# Altium schematic symbol library DIM.SCHLIB: 488 symbols (part 5 of 5)
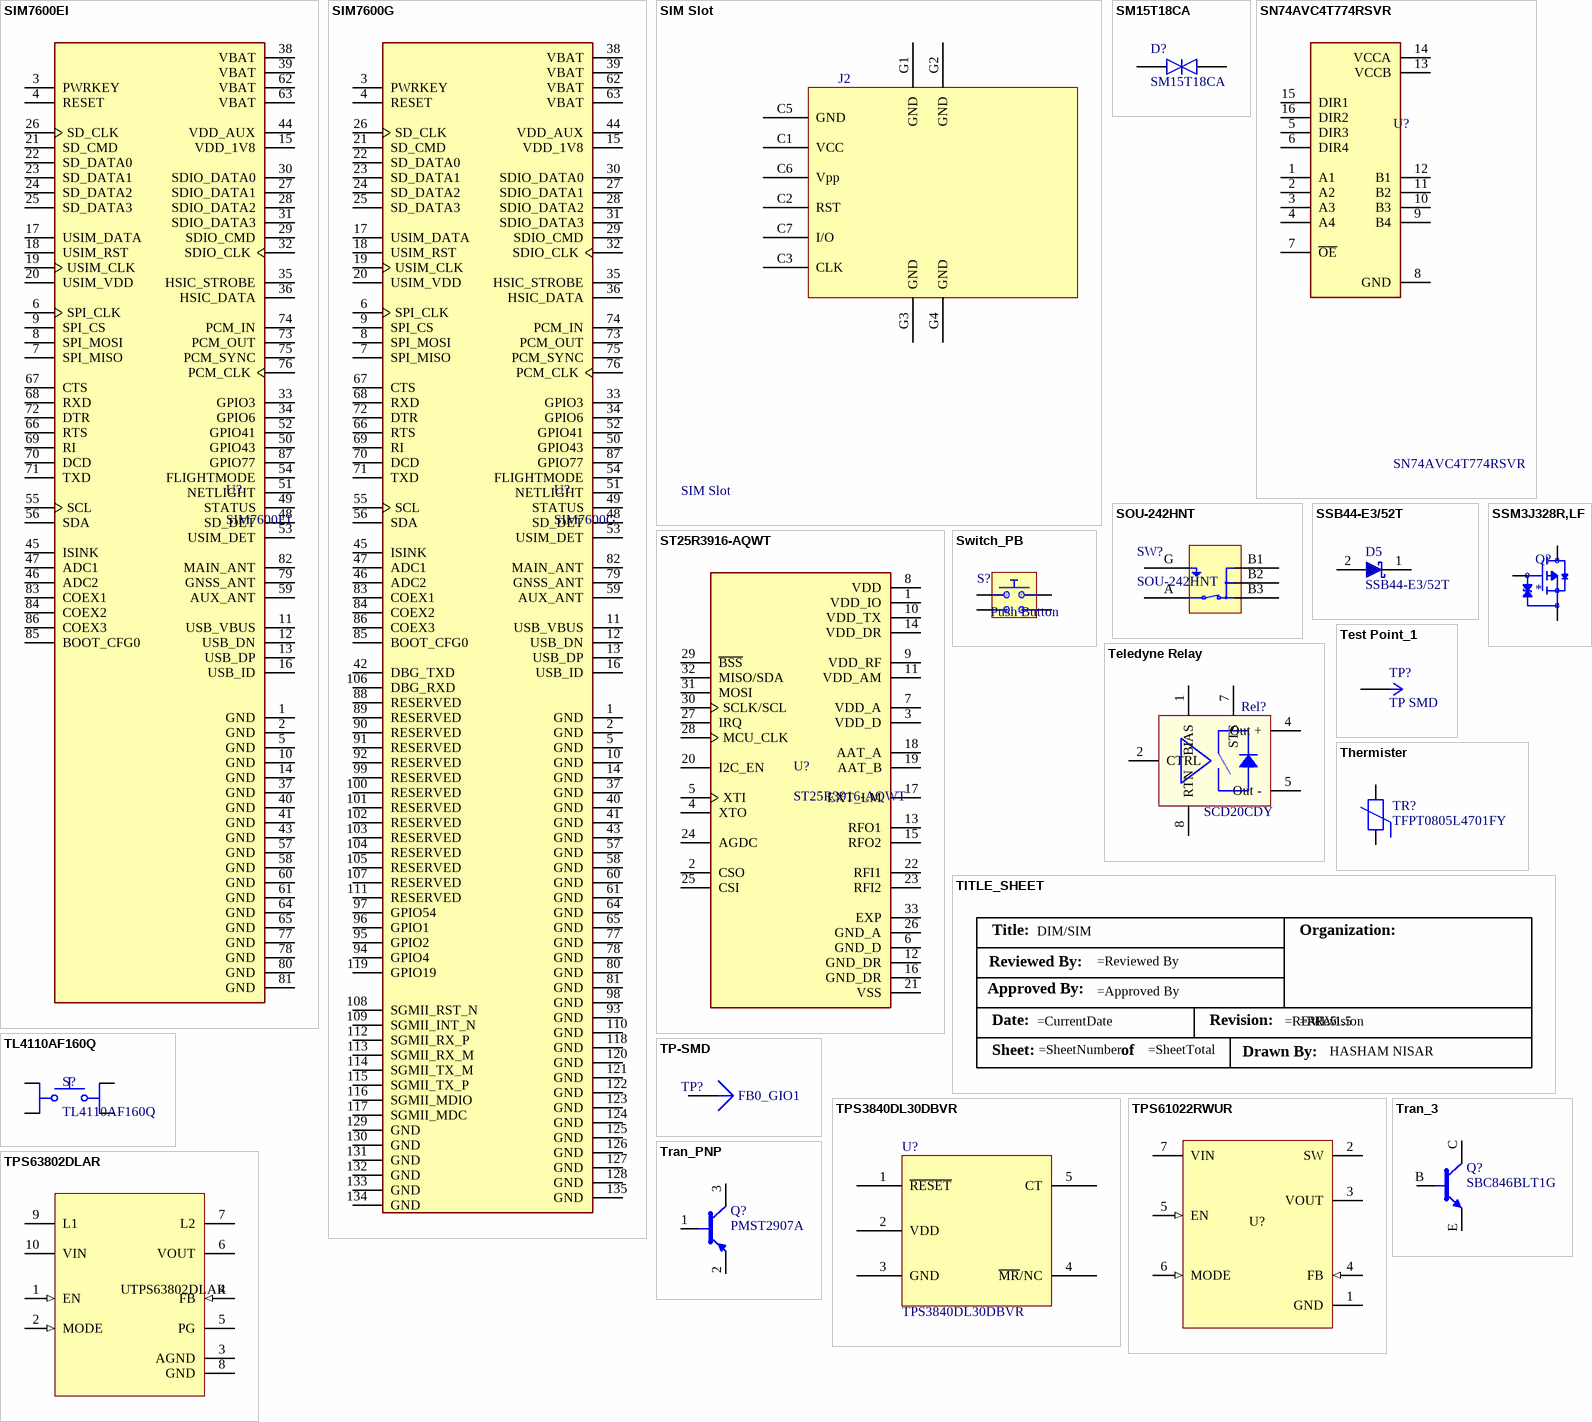
[diagram p29: symbols SIM7600EI to Tran_PNP]

## Test Point_1
designator TP?, comment TP SMD  (no BOM)
Test Pint SMD; Package: SMD; Value: TP SMD
footprint TP_SMD
pins: 1

## Thermister
designator TR?, comment TFPT0805L4701FY
THERMISTOR_TFPT0805L4701FY; Manufacturer: Vishay Dale; Manufacturer Part Number: TFPT0805L4701FY; Package: 0805 (2012 Metric); Supplier: Digi-Key; Supplier Part Number: TFPT0805L4701FY-ND; Value: TFPT0805L4701FY; Operating Temperature: -55°C ~ 150°C
footprint THERMISTOR(0805)
pins: 1, 2

## TITLE_SHEET
designator TITLE_SHEET?  (value not drawn)
text: Title:; DIM/SIM; Organization:; Reviewed By:; Approved By:; Date:; Revision:; Sheet:; of; Drawn By:; HASHAM NISAR

## TL4110AF160Q
designator S?
Tactile Switch SPST-NO Side Actuated Edge Mount, Right Angle; MF: E-Switch; Value: TL4110AF160Q; MPN: TL4110AF160Q
footprint SW_TL4110AF160Q
pins: 1_1, 1_2, 2_1, 2_2

## TP-SMD
designator TP?, comment FB0_GIO1  (no BOM)
Test Pin; Value: FB0_GIO1
signal-integrity model Connector
footprint TP_SMD
pins: 1

## TPS3840DL30DBVR
designator U?
Manufacturer: Texas Instruments; Manufacturer Part Number: TPS3840DL30DBVR; Stock 1: 2743; Pricing 1: 1=1.2, 10=1.07, 100=0.8339, 500=0.6889, 1000=0.5438 (USD); Supplier 1: Digi-Key; Supplier Part Number 1: 296-TPS3840DL30DBVRCT-ND; Value: TPS3840DL30DBVR
footprint SOT-23-5
pins: 1 ~{RESET}, 2 VDD, 3 GND, 4 ~{MR}/NC, 5 CT

## TPS61022RWUR
designator U?  (value not drawn)
boost converterType Adjustable 2.2V~5.5V 500mV~5.5V VQFN-7(2x2) DC-DC Converters ROHS; Manufacturer: Texas Instruments; SPN: C915088; MPN: TPS61022RWUR; Value: TPS61022RWUR; Package: SMD; Supplier: LCSC
pins: 1 GND (power), 2 SW (power), 3 VOUT (power), 4 FB (in), 5 EN (in), 6 MODE (in), 7 VIN (power)

## TPS63802DLAR
designator U1
Manufacturer: Texas Instruments; Manufacturer Part Number: TPS63802DLAR; Value: N/A; PackageReference: TPS63802DLAR
pins: 1 EN (in), 2 MODE (in), 3 AGND (power), 4 FB (in), 5 PG (oc), 6 VOUT (power), 7 L2, 8 GND (power), 9 L1, 10 VIN (power)

## Tran_3
designator Q?, comment SBC846BLT1G
NPN_SBC846BLT1G; Manufacturer: ON Semiconductor; Manufacturer Part Number: SBC846BLT1G; Value: SBC846BLT1G; Supplier: Digikey; Package: SOT-23-3 (TO-236); Supplier Part Number: SBC846BLT1GOSCT-ND; Operating Temperature: -55°C ~ 150°C (TJ)
footprint SOT23-3
pins: B, C, E

## Tran_PNP
designator Q?, comment PMST2907A
Bipolar (BJT) Transistor PNP 60V 600mA 200MHz 200mW Surface Mount SC-70; Manufacturer Part Number: PMST2907A,115; Manufacturer: Nexperia USA Inc.; Value: PMST2907A; Supplier: Digikey; Package: SC-70; Supplier Part Number: 1727-5224-2-ND; Operating Temperature: -55°C ~ 150°C (TJ)
footprint SC-70
pins: 1 B, 2 E, 3 C

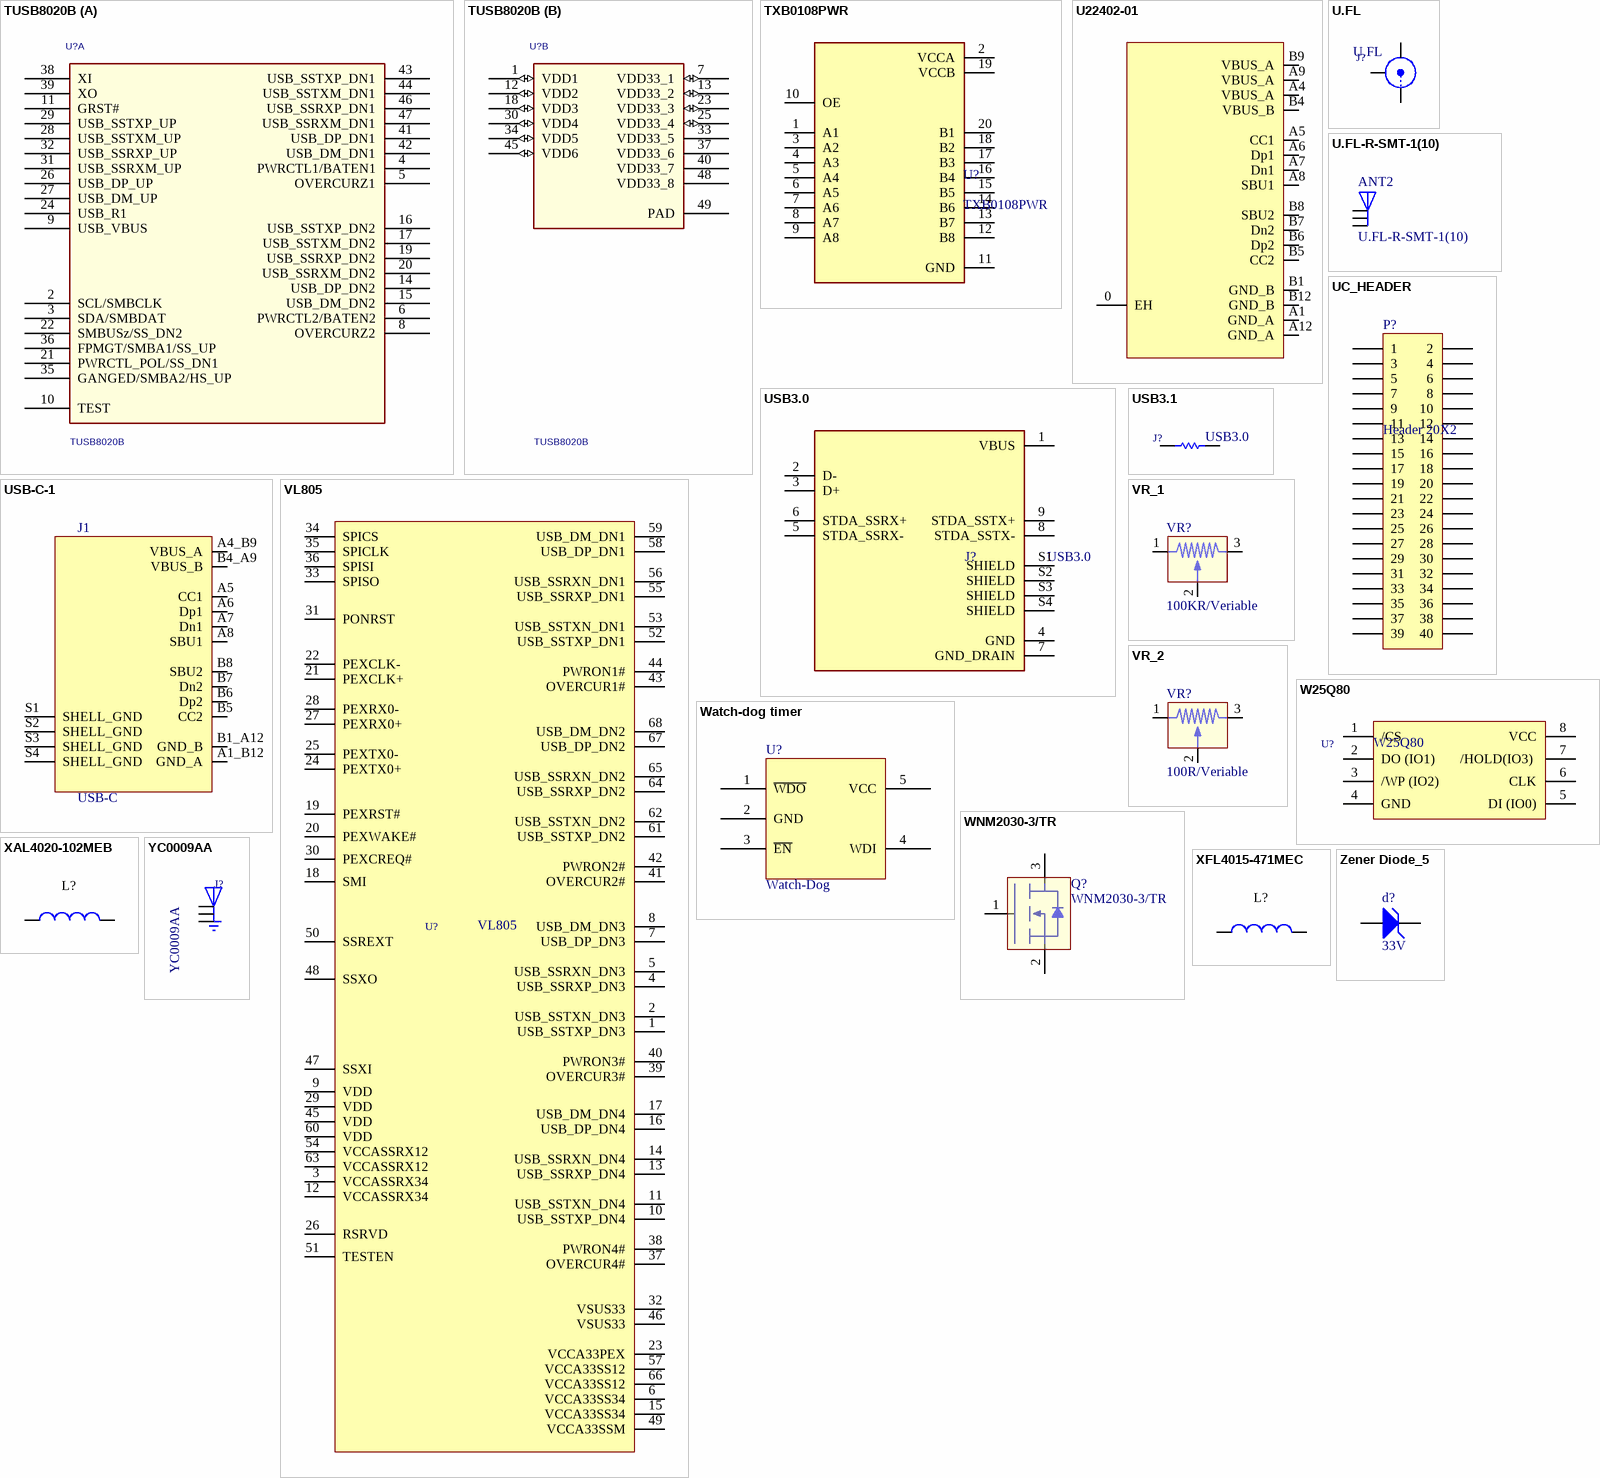
[diagram p25: symbols TUSB8020B to Zener Diode_5]

## TUSB8020B
designator U?
USB Interface IC Two-Port USB 3.0 Hub; Manufacturer partnumber: TUSB8020BIPHPR; Manufacturer: TEXAS INSTRUMENTS; Supplier partnumber: 595-TUSB8020BIPHPR; Supplier: Mouser; MANUFACTURER'S PART NUMBER: TUSB8020B; Value: TUSB8020B
part A pins: 2 SCL/SMBCLK, 3 SDA/SMBDAT, 4 PWRCTL1/BATEN1, 5 OVERCURZ1, 6 PWRCTL2/BATEN2, 8 OVERCURZ2, 9 USB_VBUS, 10 TEST, 11 GRST#, 14 USB_DP_DN2, 15 USB_DM_DN2, 16 USB_SSTXP_DN2, 17 USB_SSTXM_DN2, 19 USB_SSRXP_DN2, 20 USB_SSRXM_DN2, 21 PWRCTL_POL/SS_DN1, 22 SMBUSz/SS_DN2, 24 USB_R1, 26 USB_DP_UP, 27 USB_DM_UP, 28 USB_SSTXM_UP, 29 USB_SSTXP_UP, 31 USB_SSRXM_UP, 32 USB_SSRXP_UP, 35 GANGED/SMBA2/HS_UP, 36 FPMGT/SMBA1/SS_UP, 38 XI, 39 XO, 41 USB_DP_DN1, 42 USB_DM_DN1, 43 USB_SSTXP_DN1, 44 USB_SSTXM_DN1, 46 USB_SSRXP_DN1, 47 USB_SSRXM_DN1
part B pins: 1 VDD1 (io), 7 VDD33_1 (io), 12 VDD2 (io), 13 VDD33_2 (io), 18 VDD3 (io), 23 VDD33_3 (io), 25 VDD33_4 (io), 30 VDD4 (io), 33 VDD33_5, 34 VDD5 (io), 37 VDD33_6, 40 VDD33_7, 45 VDD6 (io), 48 VDD33_8, 49 PAD

## TXB0108PWR
designator U?
IC TRANSLATOR BIDIR 20TSSOP; Manufacturer: Texas Instruments; Manufacturer Part Number: TXB0108PWR; Package: 20TSSOP; Supplier: Digi-Key; Supplier Part Number: 296-21527-1-ND; Value: TXB0108PWR
footprint SOP65P640X120-20N
pins: 1 A1, 2 VCCA, 3 A2, 4 A3, 5 A4, 6 A5, 7 A6, 8 A7, 9 A8, 10 OE, 11 GND, 12 B8, 13 B7, 14 B6, 15 B5, 16 B4, 17 B3, 18 B2, 19 VCCB, 20 B1

## U22402-01
designator U?  (value not drawn)
Manufacturer: MUP(德海威); Add into BOM: yes; Connector Type: Type-C; Gender: Female; Number of Contacts: 16P; Symbol: U22402-01; Device: U22402-01; LCSC Part Name: Type-C 母 沉板; Supplier Part: C20624790; Manufacturer Part: U22402-01; Supplier Footprint: SMD; JLCPCB Part Class: Extended Part; Datasheet: https://atta.szlcsc.com/upload/public/pdf/source/20240223/8A09FA8ADF55A90A651CE38C82FA5055.pdf; Supplier: LCSC; Convert to PCB: yes; Mounting Style: Sinking plate
footprint USB-SMD_U22402-01
pins: 0 EH (power), A1 GND_A (power), A4 VBUS_A (power), A5 CC1, A6 Dp1, A7 Dn1, A8 SBU1, A9 VBUS_A (power), A12 GND_A (power), B1 GND_B (power), B4 VBUS_B (power), B5 CC2, B6 Dp2, B7 Dn2, B8 SBU2, B9 VBUS_A (power), B12 GND_B (power)

## U.FL
designator J?
Copper Alloy 1 Inner needle IPEX Board Edge 1.25mm 6GHz 50Ω 2mm SMD RF Connectors / Coaxial Connectors ROHS; Manufacturer: TE Connectivity; MPN: 1909763-1; SPN: C392444; Package: SMD; Supplier: LCSC; Temperature: -55 to 155; Value: U.FL
pins: 1 X, 2 Y, 3

## U.FL-R-SMT-1(10)
designator ANT2
CONN U.FL RCPT STR 50 OHM SMD; Manufacturer: Hirose Electric Co Ltd; Manufacturer_PartNum: U.FL-R-SMT-1(10); Value: U.FL-R-SMT-1(10); Package: Through Hole; Supplier: Digi-Key; Supplier_PartNum: H11891TR-ND
footprint U.FL-R-SMT-1(10)
pins: 1 GND, 2 SIG, 3 GND

## UC_HEADER
designator P?, comment Header 20X2
Header20x2; Manufacturer: Samtec Inc.; Manufacturer Part Number: FTE-120-01-G-DV; Manufacturer Part Number Female: CLE-120-01-G-DV; Package: SMD; Supplier: Digi-Key; Supplier Part Number: SAM1144-20-ND; Value: Header 20X2; Supplier Part Number female: SAM1142-20-ND; Operating Temperature: -55°C ~ 105°C
footprint 40PIN-0.8mm
pins: 1, 2, 3, 4, 5, 6, 7, 8, 9, 10, 11, 12, 13, 14, 15, 16, 17, 18, 19, 20, 21, 22, 23, 24, 25, 26, 27, 28, 29, 30, 31, 32, 33, 34, 35, 36, 37, 38, 39, 40

## USB3.0
designator J?
CONN RCPT USB3.0 TYPEA 9POS R/A; Manufacturer: Molex; Manufacturer Part Number: 0483930003; Package: TH; Supplier: Digikey; Supplier Part Number: WM10413TR-ND; Value: USB3.0; Operating Temperature: -55°C ~ 155°C
footprint USB3.0
pins: 1 VBUS, 2 D-, 3 D+, 4 GND, 5 STDA_SSRX-, 6 STDA_SSRX+, 7 GND_DRAIN, 8 STDA_SSTX-, 9 STDA_SSTX+, S1 SHIELD, S2 SHIELD, S3 SHIELD, S4 SHIELD

## USB3.1
designator J?, comment USB3.0
CONN RCPT USB3.0 TYPEA 9POS R/A; Manufacturer: Molex; Manufacturer Part Number: 0483920003; Package: TH; Supplier: Digikey; Supplier Part Number: WM10412TR-ND; Temperature: -55 to 155; Value: USB3.0
pins: 1, 2

## USB-C-1
designator J1, comment USB-C
5A USB 3.1 1 Recessed Mount 16P Female -45℃~+85℃ Type-C SMD USB Connectors ROHS; MPN: TYPEC-302-BRP16SC16; Manufacturer: XUNPU; SPN: C2835313; Supplier: LCSC; Value: USB-C
footprint USB-C-1
pins: A1_B12 GND_A (power), A4_B9 VBUS_A (power), A5 CC1, A6 Dp1, A7 Dn1, A8 SBU1, B1_A12 GND_B (power), B4_A9 VBUS_B (power), B5 CC2, B6 Dp2, B7 Dn2, B8 SBU2, S1 SHELL_GND (power), S2 SHELL_GND (power), S3 SHELL_GND (power), S4 SHELL_GND (power)

## VL805
designator U?
Value: VL805
pins: 1 USB_SSTXP_DN3, 2 USB_SSTXN_DN3, 3 VCCASSRX34, 4 USB_SSRXP_DN3, 5 USB_SSRXN_DN3, 6 VCCA33SS34, 7 USB_DP_DN3, 8 USB_DM_DN3, 9 VDD, 10 USB_SSTXP_DN4, 11 USB_SSTXN_DN4, 12 VCCASSRX34, 13 USB_SSRXP_DN4, 14 USB_SSRXN_DN4, 15 VCCA33SS34, 16 USB_DP_DN4, 17 USB_DM_DN4, 18 SMI, 19 PEXRST#, 20 PEXWAKE#, 21 PEXCLK+, 22 PEXCLK-, 23 VCCA33PEX, 24 PEXTX0+, 25 PEXTX0-, 26 RSRVD, 27 PEXRX0+, 28 PEXRX0-, 29 VDD, 30 PEXCREQ#, 31 PONRST, 32 VSUS33, 33 SPISO, 34 SPICS, 35 SPICLK, 36 SPISI, 37 OVERCUR4#, 38 PWRON4#, 39 OVERCUR3#, 40 PWRON3#, 41 OVERCUR2#, 42 PWRON2#, 43 OVERCUR1#, 44 PWRON1#, 45 VDD, 46 VSUS33, 47 SSXI, 48 SSXO, 49 VCCA33SSM, 50 SSREXT, 51 TESTEN, 52 USB_SSTXP_DN1, 53 USB_SSTXN_DN1, 54 VCCASSRX12, 55 USB_SSRXP_DN1, 56 USB_SSRXN_DN1, 57 VCCA33SS12, 58 USB_DP_DN1, 59 USB_DM_DN1, 60 VDD, 61 USB_SSTXP_DN2, 62 USB_SSTXN_DN2, 63 VCCASSRX12, 64 USB_SSRXP_DN2, 65 USB_SSRXN_DN2, 66 VCCA33SS12, 67 USB_DP_DN2, 68 USB_DM_DN2

## VR_1
designator VR?, comment 100KR/Veriable
100KR_Variable Resistor; Manufacturer: Bourns; Manufacturer Part Number: PVG5H104C03R00; Value: 100KR/Veriable; Package: PVG5A; Supplier: Mouser; Supplier Part Number: 81-PVG5H104C03R00
footprint PVG5A
pins: 1 A, 2 B, 3 C

## VR_2
designator VR?, comment 100R/Veriable
100R_Variable Resistor; Manufacturer: Bourns; Manufacturer Part Number: PVG5A101C03R00; Value: 100R/Veriable; Package: PVG5A; Supplier: Mouser; Supplier Part Number: 81-PVG5A101C03R00
footprint PVG5A
pins: 1 A, 2 B, 3 C

## W25Q80
designator U?
IC FLASH 8MBIT SPI 104MHZ 8SOIC; Manufacturer: Winbond Electronics; Manufacturer Part Number: W25Q80DVSNIG TR; Package: SOIC8; Supplier: Digikey; Supplier Part Number: W25Q80DVSNIGTR-ND; Temperature: -55 to 155; Value: W25Q80
pins: 1 /CS, 2 DO (IO1), 3 /WP (IO2), 4 GND, 5 DI (IO0), 6 CLK, 7 /HOLD(IO3) , 8 VCC

## Watch-dog timer
designator U?, comment Watch-Dog
Manufacturer Part Number: STWD100NYWY3F; Manufacturer: STMicroelectronics; Supplier: Digi-Key; Value: Watch-Dog; Supplier Part Number: 497-10058-1-ND; Package: SOT-23-5
footprint SOT-23-5
pins: 1 ~{WDO}, 2 GND, 3 ~{EN}, 4 WDI, 5 VCC

## WNM2030-3/TR
designator Q?
N-Channel 20V 880mA 1V @ 250uA 310mΩ @ 550mA,4.5V 370mW SOT-723 MOSFET RoHS; Manufacturer: WILLSEMI(Will Semicon); Manufacturer Availability: Active; Manufacturer Part Number: WNM2030-3/TR; Package: SOT-723; Supplier Part Number: C239769; Supplier: LCSC; Value: WNM2030-3/TR; Operating Temperature: -55°C ~ 150°C (TJ)
pins: 1, 2, 3

## XAL4020-102MEB
designator L?  (value not drawn)
SMD,4x4mm Power Inductors ROHS; Manufacturer Name: Coilcraft; SPN: C4555951; PackageReference: XAL4020-102MEB; Manufacturer Part Number: XAL4020-102MEB; Supplier: LCSC
pins: 1, 2

## XFL4015-471MEC
designator L?  (value not drawn)
SMD,4x4mm Power Inductors ROHS; Manufacturer Name: Coilcraft; SPN: C18221164; PackageReference: SMD,4x4mm; Manufacturer Part Number: XFL4015-471MEC; Supplier: LCSC
pins: 1, 2

## YC0009AA
designator J?
Manufacturer: Quectel; SPN: 2958-YC0009AACT-ND; Package: SMD; MPN: YC0009AA; Supplier: DigiKey; Temperature: -55 to 155; Value: YC0009AA
footprint YC0009AA
pins: 1 INPUT, 2 GND (power), 3 GND (power)

## Zener Diode_5
designator d?, comment 33V
Zener Diodes Voltage Regulator; Manufacturer: Microsemi; Manufacturer Part Number: JAN1N973BUR-1; Package: DO-213AA; Supplier: Mouser; Supplier Part Number: 494-JAN1N973BUR-1; Value: 33V
footprint DO-213AA
pins: 1 A, 2 K